# Altium footprint library Francisco_PCB.PcbLib: 51 footprints (part 1 of 4)
Each footprint in its own frame and in the unit in brackets; x right, y up, seen from the top. Pads: shape width x height; smd on the part's side, far side on the other; paste and mask are expansions set on the pad; w line width, h text height; cw(c..) or ccw(c..) is an arc to the next point about the centre after c.
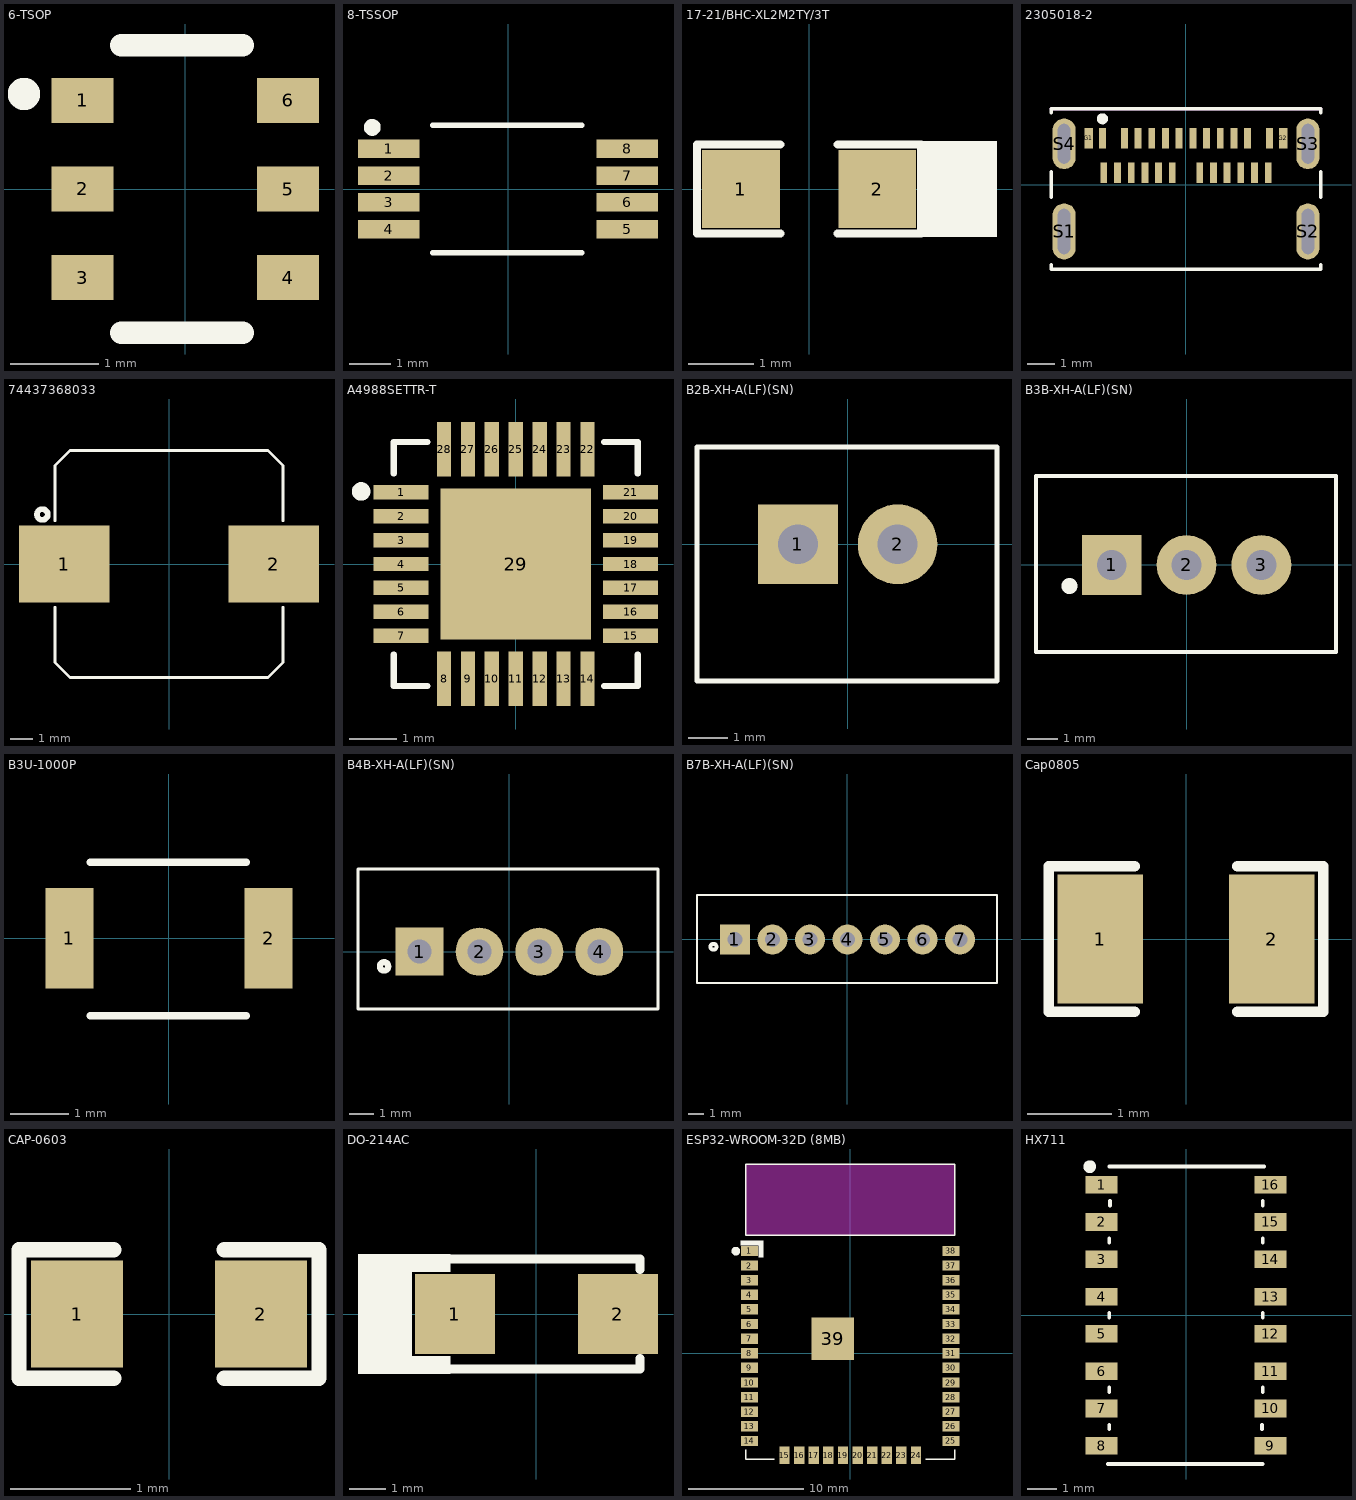
[diagram p0: the footprints below, top view; thin cyan lines are the x and y axes]

## 6-TSOP [mil]
pads (6):
  rect 27.52x20 smd: 1(-45.77,39.41) 2(-45.77,0) 3(-45.77,-39.41) 4(45.77,-39.41) 5(45.77,0) 6(45.77,39.41)
Top Overlay:
  circle w10: c-71.85,42.32 r2.2
  lines w10: -28.54,-63.98 25.59,-63.98 ; -28.54,63.98 25.59,63.98
3D body "User Library-TSOP-6.step": height 38.98, standoff -0.39, extent -53.14,-59.06 53.16,59.05

## 8-TSSOP [mm]
pads (8):
  rect 1.5x0.45 smd: 1(-2.9,0.975) 2(-2.9,0.325) 3(-2.9,-0.325) 4(-2.9,-0.975) 5(2.9,-0.975) 6(2.9,-0.325) 7(2.9,0.325) 8(2.9,0.975)
Top Overlay:
  circle w0.254: c-3.302,1.499 r0.076
  lines w0.127: -1.829,-1.549 1.803,-1.549 ; -1.829,1.549 1.803,1.549
3D body "TPS2111APWR.STEP": height 1.2, standoff 0, extent -3.2,-1.5 3.2,1.5

## 17-21/BHC-XL2M2TY/3T [mm] "Blue 0805 Light Emitting Diodes (LED) ROHS"
pads (2):
  rect 1.2x1.2 smd: 1(-1.05,0) 2(1.05,0)
Top Overlay:
  rectangle: 1.725,-0.737 2.896,0.737
  lines w0.127: -0.444,0.687 -1.727,0.687 -1.727,-0.687 -0.44,-0.687 ; 0.438,-0.686 1.725,-0.686 1.725,0.688 0.442,0.688
3D body "everlight-17-21-0805LED-BLUE.STEP": height 1.1, standoff -0.01, extent -1,-0.625 1,0.625

## 2305018-2 [mm]
pads (30):
  rect 0.25x0.75 smd: A1(-3.05,1.7) A2(-2.25,1.7) A3(-1.75,1.7) A4(-1.25,1.7) A5(-0.75,1.7) A6(-0.25,1.7) A7(0.25,1.7) A8(0.75,1.7) A9(1.25,1.7) A10(1.75,1.7) A11(2.25,1.7) A12(3.05,1.7) B1(3,0.45) B2(2.5,0.45) B3(2,0.45) B4(1.5,0.45) B5(1,0.45) B6(0.5,0.45) B7(-0.5,0.45) B8(-1,0.45) B9(-1.5,0.45) B10(-2,0.45) B11(-2.5,0.45) B12(-3,0.45)
  rect 0.3x0.75 smd: G1(-3.55,1.7) G2(3.55,1.7)
  oval 0.85x2.05 hole 0.45 slot 1.65 at 90 deg: S1(-4.45,-1.7) S2(4.45,-1.7)
  oval 0.85x1.85 hole 0.45 slot 1.45 at 90 deg: S3(4.45,1.5) S4(-4.45,1.5)
Top Overlay:
  circle w0.2: c-3.05,2.413 r0.1
  lines w0.127: -4.925,-2.906 -4.925,-3.075 4.925,-3.075 4.925,-2.906 ; -4.925,-0.444 -4.925,0.48 ; -4.925,2.634 -4.925,2.775 4.925,2.775 4.925,2.634 ; 4.925,-0.444 4.925,0.48
Mechanical 13:
  lines w0.127: -4.925,2.775 4.925,2.775
3D body "2305018-2--3DModel-STEP-56544.STEP": height 3.53, standoff -0.53, extent -4.919,-5.856 4.919,2.794

## 74437368033 [mm]
pads (2):
  rect 4.1x3.5 smd: 1(-4.75,0) 2(4.75,0)
Top Overlay:
  circle w0.254: c-5.742,2.244 r0.246
  lines w0.127: -5.17,-1.958 -5.17,-4.466 -4.488,-5.148 4.488,-5.148 5.17,-4.466 5.17,-1.958 ; -5.17,1.958 -5.17,4.466 -4.488,5.148 4.488,5.148 5.17,4.466 5.17,1.958
3D body "74437368010_Download_STP_WE-LHMI-1040_rev1.stp": height 3.7, standoff -0.1, extent -5.5,-5 5.5,5

## A4988SETTR-T [mm]
pads (29):
  rect 1.15x0.3 smd: 1(-2.4,1.5) 2(-2.4,1) 3(-2.4,0.5) 4(-2.4,0) 5(-2.4,-0.5) 6(-2.4,-1) 7(-2.4,-1.5) 15(2.4,-1.5) 16(2.4,-1) 17(2.4,-0.5) 18(2.4,0) 19(2.4,0.5) 20(2.4,1) 21(2.4,1.5)
  rect 0.3x1.15 smd: 8(-1.5,-2.4) 9(-1,-2.4) 10(-0.5,-2.4) 11(0,-2.4) 12(0.5,-2.4) 13(1,-2.4) 14(1.5,-2.4) 22(1.5,2.4) 23(1,2.4) 24(0.5,2.4) 25(0,2.4) 26(-0.5,2.4) 27(-1,2.4) 28(-1.5,2.4)
  rect 3.15x3.15 smd: 29(0,0)
Top Overlay:
  circle w0.254: c-3.234,1.518 r0.066
  lines w0.127: -2.552,-1.892 -2.552,-2.552 -1.848,-2.552 ; -2.552,1.892 -2.552,2.552 -1.848,2.552 ; 1.848,-2.552 2.552,-2.552 2.552,-1.892 ; 1.848,2.552 2.552,2.552 2.552,1.892
3D body "User Library-QFN28-0_5.STEP": height 1, standoff 0, extent -2.5,-2.5 2.5,2.5

## B2B-XH-A(LF)(SN) [mm]
pads (2):
  rect 2x2 hole 1: 1(-1.25,0)
  round 2 hole 1: 2(1.25,0)
Top Overlay:
  lines w0.127: -3.782,-3.432 3.74,-3.432 3.74,2.442 -3.782,2.442 -3.782,-3.432
3D body "B2B-XH-A(LF)(SN)--3DModel-STEP-56544.STEP": height 7, standoff -3.4, extent -3.718,-3.366 3.682,2.384

## B3B-XH-A(LF)(SN) [mm]
pads (3):
  rect 2x2 hole 1: 1(-2.5,0)
  round 2 hole 1: 2(0,0) 3(2.5,0)
Top Overlay:
  circle w0.254: c-3.916,-0.704 r0.139
  lines w0.127: -5.032,-2.904 4.994,-2.904 4.994,2.97 -5.032,2.97 -5.032,-2.904
3D body: height 0.25, standoff 0, extent 1.254,-1.254 1.254,-1.254
3D body "B3B-XH-A_LF__SN_.stp": height 7, standoff -3.4, extent -4.972,-2.838 4.928,2.912

## B3U-1000P [mm] "SWITCH TACTILE SPST-NO 0.05A 12V"
pads (2):
  rect 0.82x1.72 smd: 1(-1.7,0) 2(1.7,0)
Top Overlay:
  lines w0.127: -1.346,-1.321 0,-1.321 1.321,-1.321 ; -1.346,1.295 0,1.295 1.321,1.295
3D body "User Library-OMRON B3U1000P.step": height 1.6, standoff 0, extent -2,-1.263 2,1.237

## B4B-XH-A(LF)(SN) [mm]
pads (4):
  rect 2x2 hole 1: 1(-3.75,0)
  round 2 hole 1: 2(-1.25,0) 3(1.25,0) 4(3.75,0)
Top Overlay:
  circle w0.254: c-5.236,-0.616 r0.176
  lines w0.127: -6.324,-2.398 -6.324,3.454 6.204,3.454 6.204,-2.398 -6.324,-2.398
3D body "B4B-XH-A-LF--SN---3DModel-STEP-56544.STEP": height 7, standoff -3.4, extent -6.258,-2.347 6.142,3.403

## B7B-XH-A(LF)(SN) [mm]
pads (7):
  rect 2x2 hole 1: 1(-7.5,0)
  round 2 hole 1: 2(-5,0) 3(-2.5,0) 4(0,0) 5(2.5,0) 6(5,0) 7(7.5,0)
Top Overlay:
  circle w0.254: c-8.932,-0.484 r0.197
  lines w0.127: -10.032,-2.904 -10.032,2.97 9.966,2.97 9.966,-2.904 -10.032,-2.904
3D body "B7B-XH-A_LF__SN_.stp": height 7, standoff -3.4, extent -9.972,-2.838 9.928,2.912

## Cap0805 [mil] "SMD 0805"
pads (2):
  rect 40x60 smd mask+2.76: 1(-40,0) 2(40,0)
Top Overlay:
  lines w5: -24,-34 -64,-34 -64,34 -24,34 ; 24,-34 64,-34 64,34 24,34
3D body "User Library-0805 SMD Capacitor.step": height 30, standoff -0.79, extent -39.36,-24.6 39.38,24.61

## CAP-0603 [mil]
pads (2):
  rect 30x35 smd mask+2.36: 1(-30,0) 2(30,0)
Top Overlay:
  lines w5: -18,-21 -49,-21 -49,21 -18,21 ; 18,-21 49,-21 49,21 18,21
3D body "User Library-CAPC1608X09.step": height 34.25, standoff -1.18, extent -31.51,-15.75 31.49,15.74

## DO-214AC [mm]
pads (2):
  rect 2.21x2.2 smd: 1(-2.25,0) 2(2.25,0)
Top Overlay:
  rectangle: -4.928,-1.65 -3.432,1.65
  rectangle: -3.454,1.166 -2.376,1.65
  rectangle: -3.454,-1.65 -2.376,-1.166
  lines w0.254: -2.618,-1.518 2.86,-1.518 ; -2.618,1.518 2.86,1.518 ; 2.86,-1.496 2.86,-1.232 ; 2.86,1.232 2.86,1.496
3D body "User Library-DO-214AC(SMA).step": height 2.24, standoff -0.04, extent -2.743,-1.397 2.743,1.397

## ESP32-WROOM-32D (8MB) [mm]
pads (39):
  rect 1.5x0.9 smd: 1(-8.75,8.88) 2(-8.75,7.61) 3(-8.75,6.34) 4(-8.75,5.07) 5(-8.75,3.8) 6(-8.75,2.53) 7(-8.75,1.26) 8(-8.75,-0.01) 9(-8.75,-1.28) 10(-8.75,-2.55) 11(-8.75,-3.82) 12(-8.75,-5.09) 13(-8.75,-6.36) 14(-8.75,-7.63) 25(8.75,-7.63) 26(8.75,-6.36) 27(8.75,-5.09) 28(8.75,-3.82) 29(8.75,-2.55) 30(8.75,-1.28) 31(8.75,-0.01) 32(8.75,1.26) 33(8.75,2.53) 34(8.75,3.8) 35(8.75,5.07) 36(8.75,6.34) 37(8.75,7.61) 38(8.75,8.88)
  rect 0.9x1.5 smd: 15(-5.71,-8.88) 16(-4.44,-8.88) 17(-3.17,-8.88) 18(-1.9,-8.88) 19(-0.63,-8.88) 20(0.64,-8.88) 21(1.91,-8.88) 22(3.18,-8.88) 23(4.45,-8.88) 24(5.72,-8.88)
  rect 3.7x3.7 smd: 39(-1.5,1.26)
Top Overlay:
  circle w0.5: c-9.931,8.865 r0.125
  rectangle: -7.959,8.328 -7.541,9.406
  rectangle: -9.521,9.362 -7.541,9.802
  lines w0.127: -9.089,-8.409 -9.089,-9.222 -6.6,-9.222 ; 6.583,-9.222 9.072,-9.222 9.072,-8.409 ; 9.086,10.244 -9.096,10.244 -9.096,16.434 9.091,16.434 9.091,10.244
Keep-Out Layer:
  rectangle: -9.042,10.287 9.042,16.383
3D body "esp-wroom-32.stp": height 3, standoff -0.04, extent -9.035,-9.157 9.035,16.383

## HX711 [mm]
pads (16):
  rect 1.1x0.6 smd: 1(-2.875,4.445) 2(-2.875,3.175) 3(-2.875,1.905) 4(-2.875,0.635) 5(-2.875,-0.635) 6(-2.875,-1.905) 7(-2.875,-3.175) 8(-2.875,-4.445) 9(2.875,-4.445) 10(2.875,-3.175) 11(2.875,-1.905) 12(2.875,-0.635) 13(2.875,0.635) 14(2.875,1.905) 15(2.875,3.175) 16(2.875,4.445)
Top Overlay:
  circle w0.254: c-3.278,5.06 r0.09
  lines w0.127: -2.667,-5.065 2.616,-5.065 ; -2.616,-3.886 -2.616,-3.734 ; -2.616,-2.616 -2.616,-2.464 ; -2.616,-0.076 -2.616,0.076 ; -2.616,2.464 -2.616,2.616 ; -2.616,5.065 2.667,5.065 ; -2.591,3.734 -2.591,3.886 ; 2.591,-3.886 2.591,-3.734 ; 2.616,-2.616 2.616,-2.464 ; 2.616,-0.076 2.616,0.076 ; 2.616,2.464 2.616,2.616 ; 2.616,3.734 2.616,3.886
3D body "User Library-SOIC127P600X175-16.step": height 1.62, standoff -0.03, extent -3.04,-5 3.04,5